# Altium footprint library StabilizatorNapiecia.PcbLib: 1 footprints
Each footprint in its own frame and in the unit in brackets; x right, y up, seen from the top. Pads: shape width x height; smd on the part's side, far side on the other; paste and mask are expansions set on the pad; w line width, h text height; cw(c..) or ccw(c..) is an arc to the next point about the centre after c.
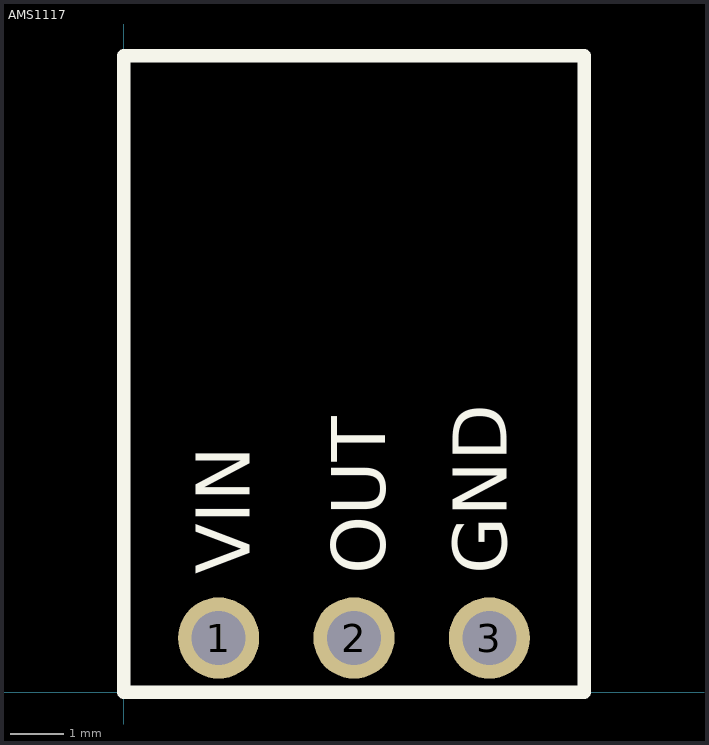
[diagram p0: the footprint, top view; thin cyan lines are the x and y axes]

## AMS1117 [mil]
pads (3):
  round 60 hole 40: 1(70,40) 2(170,40) 3(270,40)
Top Overlay:
  lines w10: 0,0 0,470 340,470 340,0 0,0
  text "GND" at 283,87 h40
  text "OUT" at 193,87 h40
  text "VIN" at 93,87 h40